# Altium footprint library comp_lib.PcbLib: 12 footprints
Each footprint in its own frame and in the unit in brackets; x right, y up, seen from the top. Pads: shape width x height; smd on the part's side, far side on the other; paste and mask are expansions set on the pad; w line width, h text height; cw(c..) or ccw(c..) is an arc to the next point about the centre after c.
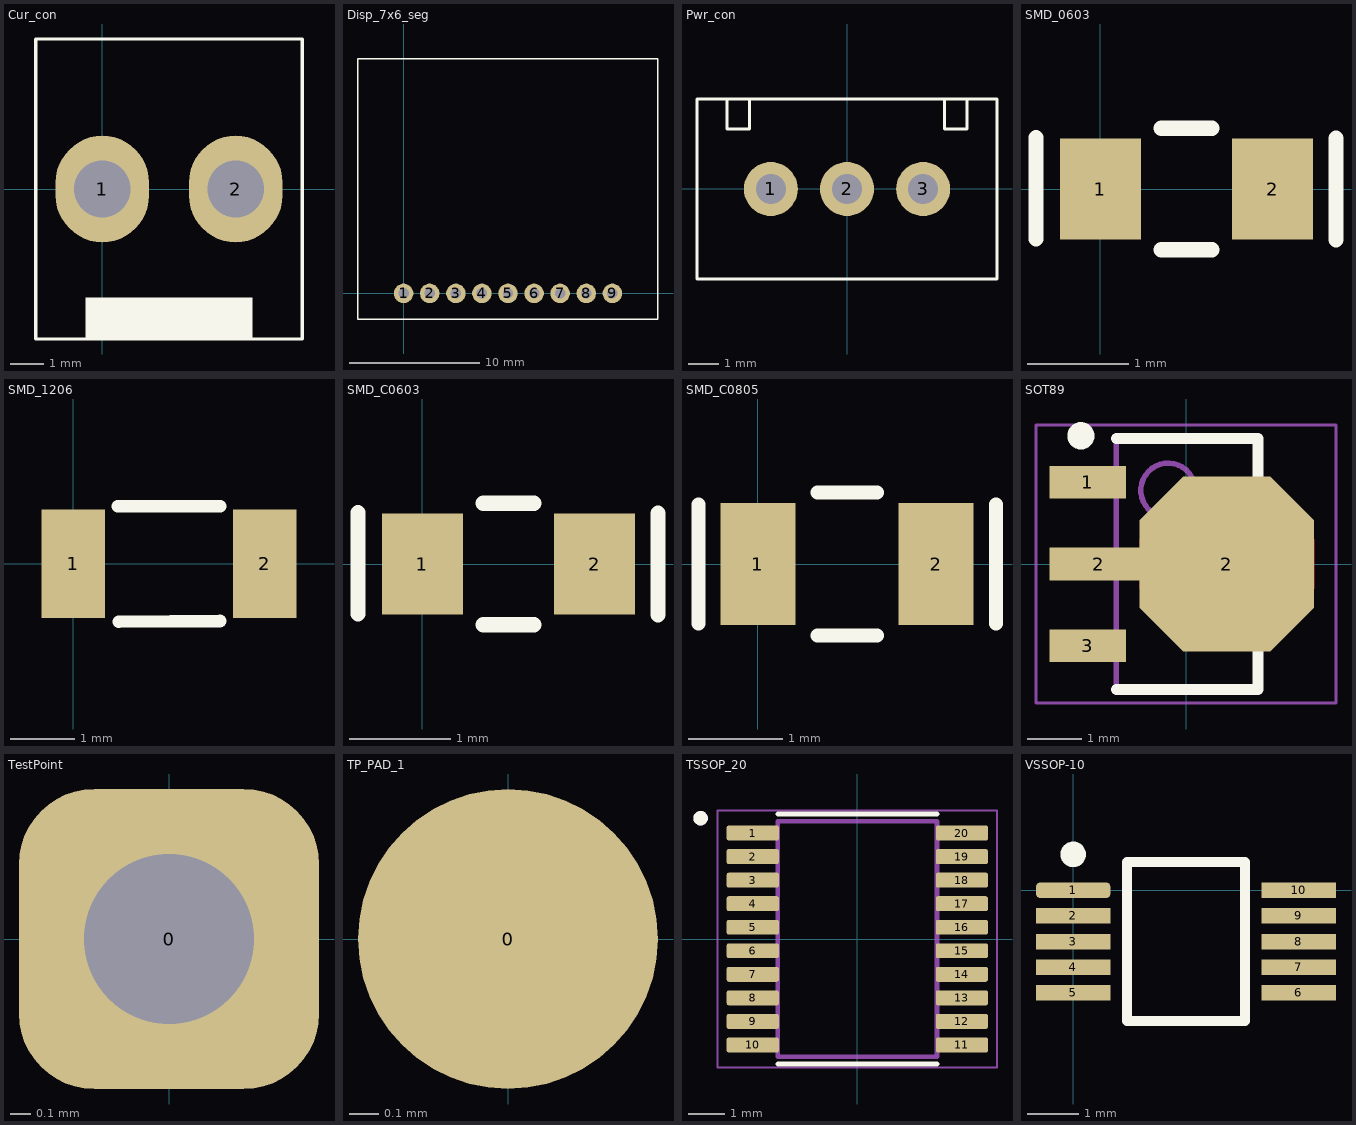
[diagram p0: the footprints below, top view; thin cyan lines are the x and y axes]

## Cur_con [mm]
pads (2):
  oval 2.8x3.2 hole 1.7 mask+0.2: 1(0,0) 2(4,0)
Top Overlay:
  rectangle: -0.5,-4.5 4.5,-3.25
  lines w0.1: -2,-4.5 6,-4.5 6,4.5 -2,4.5 -2,-4.5

## Disp_7x6_seg [mm]
pads (9):
  round 1.5 hole 0.8 mask+0.2: 1(0,0) 2(2,0) 3(4,0) 4(6,0) 5(8,0) 6(10,0) 7(12,0) 8(14,0) 9(16,0)
Top Overlay:
  lines w0.1: -3.5,-2 19.5,-2 19.5,18 -3.5,18 -3.5,-2

## Pwr_con [mm]
pads (3):
  round 1.8 hole 1 mask+0.2: 1(-2.54,0) 2(0,0) 3(2.54,0)
Top Overlay:
  lines w0.1: -4,3 -4,2 -3.25,2 -3.25,3 ; 3.25,3 3.25,2 4,2 4,3 ; -5,-3 5,-3 5,3 -5,3 -5,-3

## SMD_0603 [mm]
pads (2):
  rect 0.8x1 smd: 1(0,0) 2(1.7,0)
Top Overlay:
  lines w0.15: -0.636,-0.492 -0.636,0.508 ; 0.6,-0.6 1.1,-0.6 ; 0.6,0.6 1.1,0.6 ; 2.325,-0.5 2.325,0.5
3D body "SMD_RLC_0603.STEP": height 0.43, standoff -0.02, extent 0.037,-0.423 1.677,0.427

## SMD_1206 [mm]
height 1.27
pads (2):
  rect 1x1.7 smd: 1(0,0) 2(3,0)
Top Overlay:
  lines w0.2: 0.7,0.9 2.3,0.9 ; 0.714,-0.911 2.3,-0.9
3D body "SMD_RLC_1206.STEP": height 0.44, standoff -0.11, extent -0.091,-0.8 3.109,0.8

## SMD_C0603 [mm]
pads (2):
  rect 0.8x1 smd: 1(0,0) 2(1.7,0)
Top Overlay:
  lines w0.15: -0.636,-0.492 -0.636,0.508 ; 0.6,-0.6 1.1,-0.6 ; 0.6,0.6 1.1,0.6 ; 2.325,-0.5 2.325,0.5
3D body "SMD_C0603.STEP": height 0.9, standoff 0, extent 0,-0.45 1.7,0.45

## SMD_C0805 [mm]
height 1.27
pads (2):
  rect 0.8x1.3 smd: 1(0,0) 2(1.9,0)
Top Overlay:
  lines w0.15: -0.635,-0.635 -0.635,0.635 ; 0.635,-0.762 1.27,-0.762 ; 0.635,0.762 1.27,0.762 ; 2.54,-0.635 2.54,0.635
3D body "SMD_C0805.step": height 1.35, standoff 0, extent -0.1,-0.725 2,0.725

## SOT89 [mm] "SOT89, 3-Leads, Body 4,50x2,45mm, Pitch 1,50mm, Lead Span 4,1mm, IPC Medium Density"
height 1.6
pads (4):
  rect 1.4x0.6 smd: 1(-1.8,1.5) 3(-1.8,-1.5)
  rect 1.8x0.6 smd: 2(-1.6,0)
  oct 3.2x3.2 smd: 2(0.75,0)
Top Layer:
  region: 1.9,-0.9 2.35,-0.45 2.35,0.45 1.9,0.9 -0.4,0.9 -0.85,0.45 -0.85,-0.45 -0.4,-0.9
Top Overlay:
  circle w0.25: c-1.927,2.35 r0.125
  lines w0.2: -1.278,-2.3 1.322,-2.3 1.322,-1.35 ; -1.278,2.3 1.322,2.3 1.322,1.35
Mechanical 13:
  circle w0.1: c-0.327,1.35 r0.5
  lines w0.1: -1.278,-2.3 1.322,-2.3 1.322,2.3 -1.278,2.3 -1.278,-2.3
Mechanical 15:
  lines w0.05: -2.75,-2.55 2.75,-2.55 2.75,2.55 -2.75,2.55 -2.75,-2.55
  lines w0.1: -0.477,0 0.523,0 ; 0.022,-0.5 0.022,0.5
3D body "SOT89.step": height 1.6, standoff 0, extent -2.2,-2.3 1.85,2.3

## TestPoint [mm]
pads (1):
  rrect50% 1.5x1.5 hole 0.85: 0(0,0)
Top Overlay:
  text ".TP_Name" at 1.3,-0.5 h1.2

## TP_PAD_1 [mil]
pads (1):
  round 40 smd: 0(0,0)
Top Overlay:
  text ".TP_Name" at 32.87,-15.57 h39.37

## TSSOP_20 [mm]
height 1.1
pads (20):
  rrect25% 1.44x0.41 smd: 1(-2.885,2.925) 2(-2.885,2.275) 3(-2.885,1.625) 4(-2.885,0.975) 5(-2.885,0.325) 6(-2.885,-0.325) 7(-2.885,-0.975) 8(-2.885,-1.625) 9(-2.885,-2.275) 10(-2.885,-2.925) 11(2.885,-2.925) 12(2.885,-2.275) 13(2.885,-1.625) 14(2.885,-0.975) 15(2.885,-0.325) 16(2.885,0.325) 17(2.885,0.975) 18(2.885,1.625) 19(2.885,2.275) 20(2.885,2.925)
Top Overlay:
  circle w0.2: c-4.325,3.335 r0.1
  lines w0.127: -2.2,-3.45 2.2,-3.45 ; -2.2,3.45 2.2,3.45
Mechanical 13:
  circle w0.2: c-4.325,3.335 r0.1
  lines w0.127: -2.2,-3.25 2.2,-3.25 2.2,3.25 -2.2,3.25 -2.2,-3.25
Mechanical 15:
  lines w0.05: -3.855,-3.55 3.855,-3.55 3.855,3.55 -3.855,3.55 -3.855,-3.55
3D body "step_temp.STEP": height 0.9, standoff -0.1, extent -3.2,-3.25 3.2,3.25

## VSSOP-10 [mm] "Small Outline Package, 10-pin, 3x3mm, 1.1mm height"
height 1.1
pads (10):
  rrect50% 1.45x0.3 smd: 1(0,0)
  rect 1.45x0.3 smd: 2(0,-0.5) 3(0,-1) 4(0,-1.5) 5(0,-2) 6(4.4,-2) 7(4.4,-1.5) 8(4.4,-1) 9(4.4,-0.5) 10(4.4,0)
Top Overlay:
  circle w0.25: c0,0.7 r0.125
  lines w0.2: 1.05,-2.55 3.35,-2.55 3.35,0.55 1.05,0.55 1.05,-2.55
3D body "VSSOP-8.step": height 1.1, standoff 0, extent -0.25,-2.55 4.65,0.55